# Altium footprint library 2019-12-07_13-47-57.PcbLib: 3 footprints
Each footprint in its own frame and in the unit in brackets; x right, y up, seen from the top. Pads: shape width x height; smd on the part's side, far side on the other; paste and mask are expansions set on the pad; w line width, h text height; cw(c..) or ccw(c..) is an arc to the next point about the centre after c.
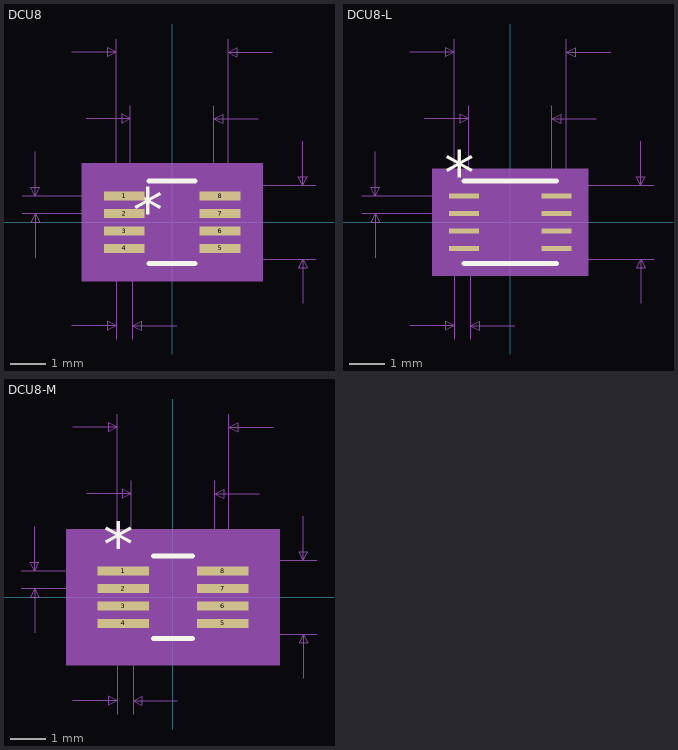
[diagram p0: the footprints below, top view; thin cyan lines are the x and y axes]

## DCU8 [mil]
pads (8):
  rect 46x10 smd: 1(-54,29.53) 2(-54,9.84) 3(-54,-9.84) 4(-54,-29.53) 5(54,-29.53) 6(54,-9.84) 7(54,9.84) 8(54,29.53)
Top Overlay:
  lines w6: -25.68,-46.5 25.68,-46.5 ; -25.68,46.5 25.68,46.5
  text "*" at -44.5,-11.5 h50
Mechanical 5:
  region: 102,-66.5 -102,-66.5 -102,66.5 102,66.5
Mechanical 7:
  lines w1: -169,9.84 -54,9.84 ; -169,29.53 -54,29.53 ; -154,-40.16 -154,9.84 ; -154,79.53 -154,29.53 ; -113,-116.5 -63,-116.5 ; -113,191.5 -63,191.5 ; -97,116.5 -47,116.5 ; -63,-131.5 -63,0 -63,206.5 ; -47,0 -47,131.5 ; -45,-131.5 -45,0 ; 0,-41.5 162,-41.5 ; 0,41.5 162,41.5 ; 5,-116.5 -45,-116.5 ; 47,0 47,131.5 ; 63,0 63,206.5 ; 97,116.5 47,116.5 ; 113,191.5 63,191.5 ; 147,-91.5 147,-41.5 ; 147,91.5 147,41.5 ; -154,9.84 -159,-0.16 -149,-0.16 -154,9.84 ; -154,29.53 -159,39.53 -149,39.53 -154,29.53 ; -63,-116.5 -73,-111.5 -73,-121.5 -63,-116.5 ; -63,191.5 -73,196.5 -73,186.5 -63,191.5 ; -47,116.5 -57,121.5 -57,111.5 -47,116.5 ; -45,-116.5 -35,-111.5 -35,-121.5 -45,-116.5 ; 47,116.5 57,121.5 57,111.5 47,116.5 ; 63,191.5 73,196.5 73,186.5 63,191.5 ; 147,-41.5 142,-51.5 152,-51.5 147,-41.5 ; 147,41.5 142,51.5 152,51.5 147,41.5
  text "Default Padstyle: RX46Y10D0T" at -350,-241.5 h50
  text "Pin One Padstyle: RX46Y10D0T" at -350,-301.5 h50
  text "Alt 1 Padstyle: OX60Y90D30P" at -337.5,-481.5 h50
  text "Alt 2 Padstyle: OX90Y60D30P" at -337.5,-541.5 h50
  text "0.094in/2.388mm" at -93.75,136.5 h25
  text "0.126in/3.2mm" at -81.25,211.5 h25
  text "0.083in/2.108mm" at 167,-12.5 h25
  text "0.02in/0.5mm" at -324,7.18 h25
  text "0.014in/0.356mm" at -147.75,-161.5 h25
Mechanical 13:
  lines w0: -12,41.5 ccw(c0,41.5) 12,41.5
  lines w1: -63,-34.53 -63,-24.53 -47,-24.53 -47,-34.53 -63,-34.53 ; -63,-14.84 -63,-4.84 -47,-4.84 -47,-14.84 -63,-14.84 ; -63,4.84 -63,14.84 -47,14.84 -47,4.84 -63,4.84 ; -63,24.53 -63,34.53 -47,34.53 -47,24.53 -63,24.53 ; -47,-41.5 47,-41.5 47,41.5 -47,41.5 -47,-41.5 ; 47,-34.53 47,-24.53 63,-24.53 63,-34.53 47,-34.53 ; 47,-14.84 47,-4.84 63,-4.84 63,-14.84 47,-14.84 ; 47,4.84 47,14.84 63,14.84 63,4.84 47,4.84 ; 47,24.53 47,34.53 63,34.53 63,24.53 47,24.53
  text "*" at -44.5,-11.5 h50
Mechanical 15:
  region: -57,-41.37 -87,-41.37 -87,41.37 -57,41.37 -57,51.5 57,51.5 57,41.37 87,41.37 87,-41.37 57,-41.37 57,-51.5 -57,-51.5
  lines w6: -87,-41.37 -87,41.37 -57,41.37 -57,51.5 57,51.5 57,41.37 87,41.37 87,-41.37 57,-41.37 57,-51.5 -57,-51.5 -57,-41.37 -87,-41.37
3D body: height 10, standoff 0, extent 0,0 10,10

## DCU8-L [mil]
pads (8):
  rect 34x6 smd paste+0 mask+0: 1(-52,29.53) 2(-52,9.84) 3(-52,-9.84) 4(-52,-29.53) 5(52,-29.53) 6(52,-9.84) 7(52,9.84) 8(52,29.53)
Top Overlay:
  lines w6: -52,-46.5 52,-46.5 ; -52,46.5 52,46.5
  text "*" at -74.5,30.53 h50
Mechanical 5:
  region: 88,-60.5 -88,-60.5 -88,60.5 88,60.5
Mechanical 7:
  lines w1: -167,9.84 -52,9.84 ; -167,29.53 -52,29.53 ; -152,-40.16 -152,9.84 ; -152,79.53 -152,29.53 ; -113,-116.5 -63,-116.5 ; -113,191.5 -63,191.5 ; -97,116.5 -47,116.5 ; -63,-131.5 -63,0 -63,206.5 ; -47,0 -47,131.5 ; -45,-131.5 -45,0 ; 0,-41.5 162,-41.5 ; 0,41.5 162,41.5 ; 5,-116.5 -45,-116.5 ; 47,0 47,131.5 ; 63,0 63,206.5 ; 97,116.5 47,116.5 ; 113,191.5 63,191.5 ; 147,-91.5 147,-41.5 ; 147,91.5 147,41.5 ; -152,9.84 -157,-0.16 -147,-0.16 -152,9.84 ; -152,29.53 -157,39.53 -147,39.53 -152,29.53 ; -63,-116.5 -73,-111.5 -73,-121.5 -63,-116.5 ; -63,191.5 -73,196.5 -73,186.5 -63,191.5 ; -47,116.5 -57,121.5 -57,111.5 -47,116.5 ; -45,-116.5 -35,-111.5 -35,-121.5 -45,-116.5 ; 47,116.5 57,121.5 57,111.5 47,116.5 ; 63,191.5 73,196.5 73,186.5 63,191.5 ; 147,-41.5 142,-51.5 152,-51.5 147,-41.5 ; 147,41.5 142,51.5 152,51.5 147,41.5
  text "Default Padstyle: RX34Y6D0T" at -337.5,-241.5 h50
  text "Pin One Padstyle: RX34Y6D0T" at -337.5,-301.5 h50
  text "Alt 1 Padstyle: OX60Y90D30P" at -337.5,-481.5 h50
  text "Alt 2 Padstyle: OX90Y60D30P" at -337.5,-541.5 h50
  text "0.094in/2.388mm" at -93.75,136.5 h25
  text "0.126in/3.2mm" at -81.25,211.5 h25
  text "0.083in/2.108mm" at 167,-12.5 h25
  text "0.02in/0.5mm" at -322,7.18 h25
  text "0.014in/0.356mm" at -147.75,-161.5 h25
Mechanical 13:
  lines w0: -12,41.5 ccw(c0,41.5) 12,41.5
  lines w1: -63,-34.53 -63,-24.53 -47,-24.53 -47,-34.53 -63,-34.53 ; -63,-14.84 -63,-4.84 -47,-4.84 -47,-14.84 -63,-14.84 ; -63,4.84 -63,14.84 -47,14.84 -47,4.84 -63,4.84 ; -63,24.53 -63,34.53 -47,34.53 -47,24.53 -63,24.53 ; -47,-41.5 47,-41.5 47,41.5 -47,41.5 -47,-41.5 ; 47,-34.53 47,-24.53 63,-24.53 63,-34.53 47,-34.53 ; 47,-14.84 47,-4.84 63,-4.84 63,-14.84 47,-14.84 ; 47,4.84 47,14.84 63,14.84 63,4.84 47,4.84 ; 47,24.53 47,34.53 63,34.53 63,24.53 47,24.53
  text "*" at -44.5,-11.5 h50
Mechanical 15:
  region: -51,-36.53 -73,-36.53 -73,36.53 -51,36.53 -51,45.5 51,45.5 51,36.53 73,36.53 73,-36.53 51,-36.53 51,-45.5 -51,-45.5
  lines w6: -73,-36.53 -73,36.53 -51,36.53 -51,45.5 51,45.5 51,36.53 73,36.53 73,-36.53 51,-36.53 51,-45.5 -51,-45.5 -51,-36.53 -73,-36.53
3D body: height 10, standoff 0, extent 0,0 10,10

## DCU8-M [mil]
pads (8):
  rect 58x10 smd paste+0 mask+0: 1(-56,29.53) 2(-56,9.84) 3(-56,-9.84) 4(-56,-29.53) 5(56,-29.53) 6(56,-9.84) 7(56,9.84) 8(56,29.53)
Top Overlay:
  lines w6: -21.68,-46.5 21.68,-46.5 ; -21.68,46.5 21.68,46.5
  text "*" at -78.5,34.53 h50
Mechanical 5:
  region: 120,-76.5 -120,-76.5 -120,76.5 120,76.5
Mechanical 7:
  lines w1: -171,9.84 -56,9.84 ; -171,29.53 -56,29.53 ; -156,-40.16 -156,9.84 ; -156,79.53 -156,29.53 ; -113,-116.5 -63,-116.5 ; -113,191.5 -63,191.5 ; -97,116.5 -47,116.5 ; -63,-131.5 -63,0 -63,206.5 ; -47,0 -47,131.5 ; -45,-131.5 -45,0 ; 0,-41.5 162,-41.5 ; 0,41.5 162,41.5 ; 5,-116.5 -45,-116.5 ; 47,0 47,131.5 ; 63,0 63,206.5 ; 97,116.5 47,116.5 ; 113,191.5 63,191.5 ; 147,-91.5 147,-41.5 ; 147,91.5 147,41.5 ; -156,9.84 -161,-0.16 -151,-0.16 -156,9.84 ; -156,29.53 -161,39.53 -151,39.53 -156,29.53 ; -63,-116.5 -73,-111.5 -73,-121.5 -63,-116.5 ; -63,191.5 -73,196.5 -73,186.5 -63,191.5 ; -47,116.5 -57,121.5 -57,111.5 -47,116.5 ; -45,-116.5 -35,-111.5 -35,-121.5 -45,-116.5 ; 47,116.5 57,121.5 57,111.5 47,116.5 ; 63,191.5 73,196.5 73,186.5 63,191.5 ; 147,-41.5 142,-51.5 152,-51.5 147,-41.5 ; 147,41.5 142,51.5 152,51.5 147,41.5
  text "Default Padstyle: RX58Y10D0T" at -350,-241.5 h50
  text "Pin One Padstyle: RX58Y10D0T" at -350,-301.5 h50
  text "Alt 1 Padstyle: OX60Y90D30P" at -337.5,-481.5 h50
  text "Alt 2 Padstyle: OX90Y60D30P" at -337.5,-541.5 h50
  text "0.094in/2.388mm" at -93.75,136.5 h25
  text "0.126in/3.2mm" at -81.25,211.5 h25
  text "0.083in/2.108mm" at 167,-12.5 h25
  text "0.02in/0.5mm" at -326,7.18 h25
  text "0.014in/0.356mm" at -147.75,-161.5 h25
Mechanical 13:
  lines w0: -12,41.5 ccw(c0,41.5) 12,41.5
  lines w1: -63,-34.53 -63,-24.53 -47,-24.53 -47,-34.53 -63,-34.53 ; -63,-14.84 -63,-4.84 -47,-4.84 -47,-14.84 -63,-14.84 ; -63,4.84 -63,14.84 -47,14.84 -47,4.84 -63,4.84 ; -63,24.53 -63,34.53 -47,34.53 -47,24.53 -63,24.53 ; -47,-41.5 47,-41.5 47,41.5 -47,41.5 -47,-41.5 ; 47,-34.53 47,-24.53 63,-24.53 63,-34.53 47,-34.53 ; 47,-14.84 47,-4.84 63,-4.84 63,-14.84 47,-14.84 ; 47,4.84 47,14.84 63,14.84 63,4.84 47,4.84 ; 47,24.53 47,34.53 63,34.53 63,24.53 47,24.53
  text "*" at -44.5,-11.5 h50
Mechanical 15:
  region: -67,-54.53 -105,-54.53 -105,54.53 -67,54.53 -67,61.5 67,61.5 67,54.53 105,54.53 105,-54.53 67,-54.53 67,-61.5 -67,-61.5
  lines w6: -105,-54.53 -105,54.53 -67,54.53 -67,61.5 67,61.5 67,54.53 105,54.53 105,-54.53 67,-54.53 67,-61.5 -67,-61.5 -67,-54.53 -105,-54.53
3D body: height 10, standoff 0, extent 0,0 10,10